# Altium schematic symbol library Silabs.SchLib: 89 symbols (part 2 of 2)
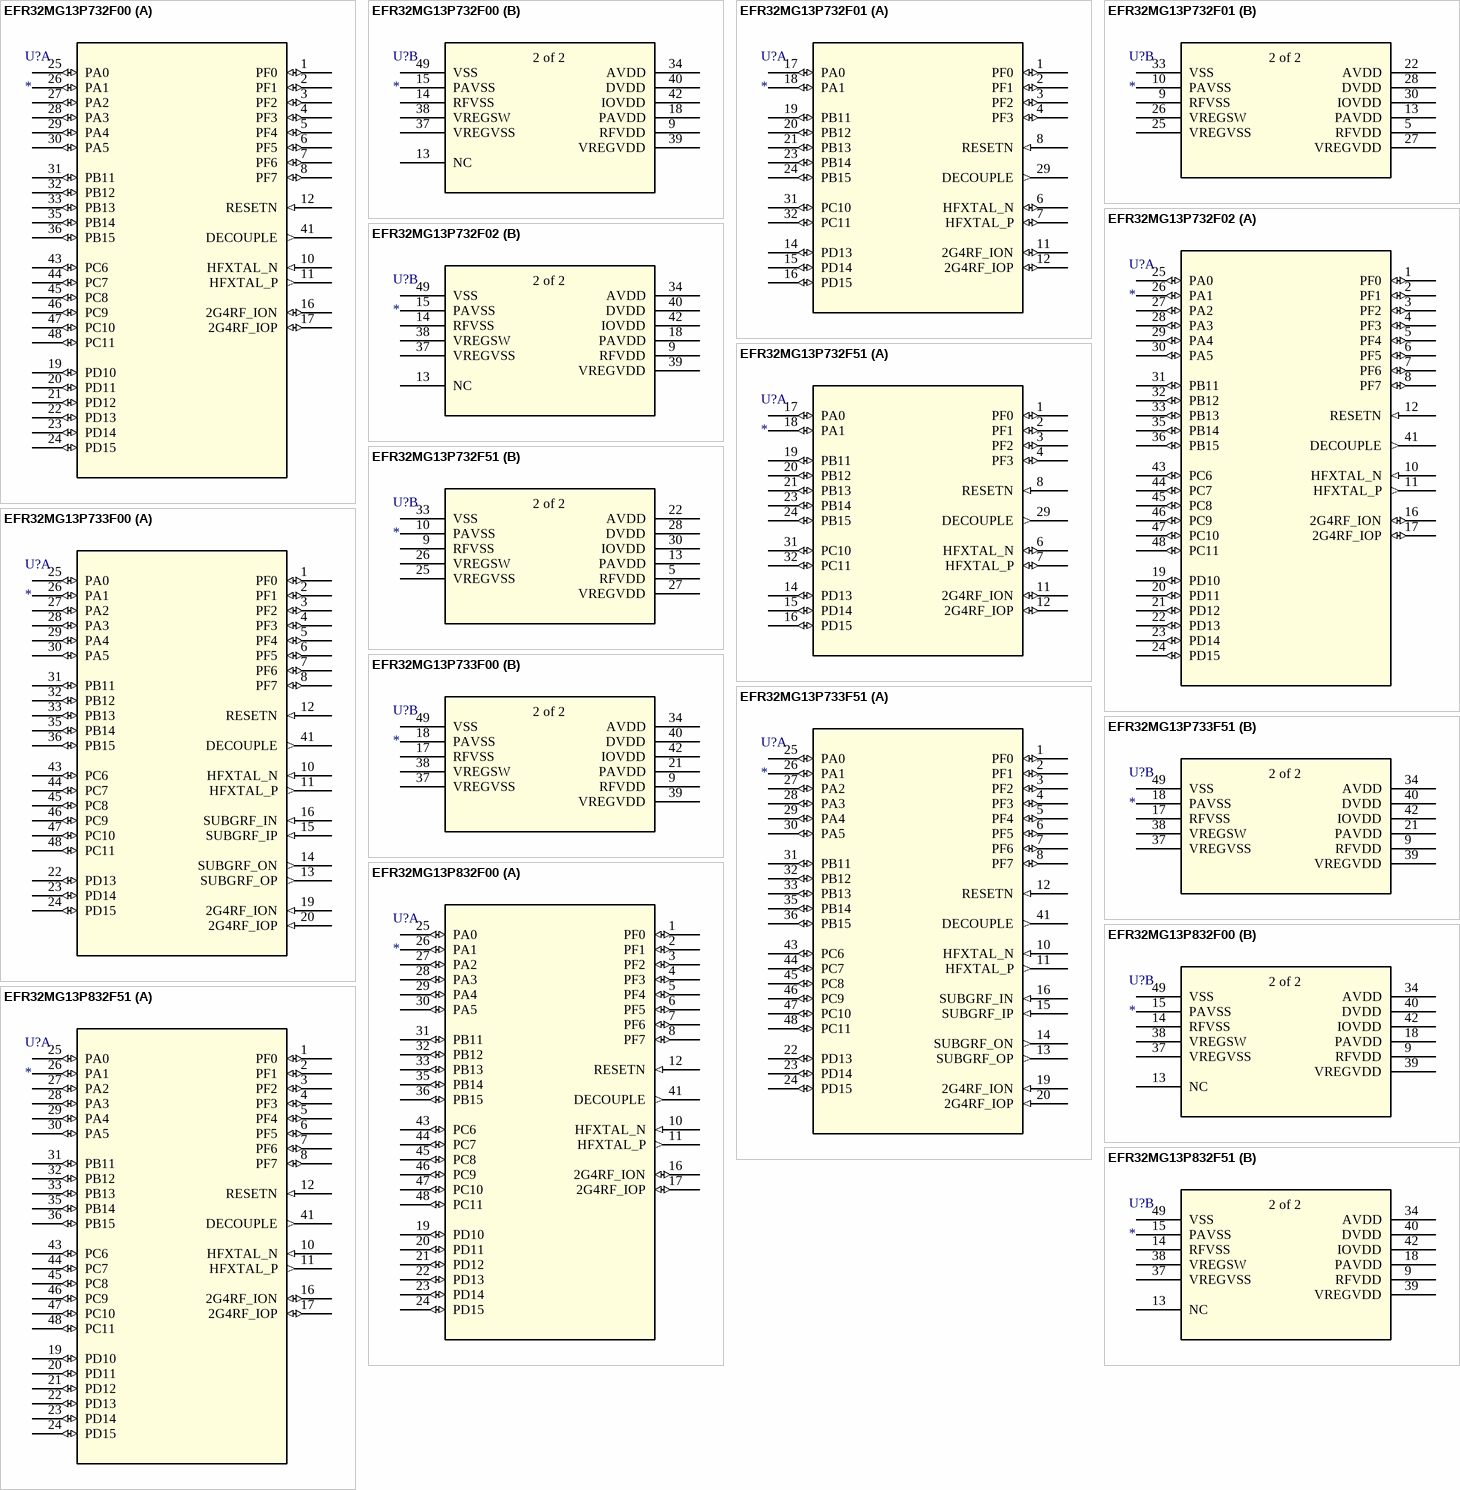
[diagram p12: symbols EFR32MG13P732F00 to EFR32MG13P832F51]

## EFR32MG13P732F51
designator U?
No Description Available; RefDes: RefDes; Type: Type
footprint RQFN32_5X5
part A pins: 1 PF0 (io), 2 PF1 (io), 3 PF2 (io), 4 PF3 (io), 6 HFXTAL_N (io), 7 HFXTAL_P (io), 8 RESETN (in), 11 2G4RF_ION (io), 12 2G4RF_IOP (io), 14 PD13 (io), 15 PD14 (io), 16 PD15 (io), 17 PA0 (io), 18 PA1 (io), 19 PB11 (io), 20 PB12 (io), 21 PB13 (io), 23 PB14 (io), 24 PB15 (io), 29 DECOUPLE (out), 31 PC10 (io), 32 PC11 (io)
part B pins: 5 RFVDD (power), 9 RFVSS (power), 10 PAVSS (power), 13 PAVDD (power), 22 AVDD (power), 25 VREGVSS (power), 26 VREGSW (power), 27 VREGVDD (power), 28 DVDD (power), 30 IOVDD (power), 33 VSS (power)
part B text: 2 of 2

## EFR32MG13P733F00
designator U?
No Description Available; RefDes: RefDes; Type: Type
footprint QFN48B_7X7
part A pins: 1 PF0 (io), 2 PF1 (io), 3 PF2 (io), 4 PF3 (io), 5 PF4 (io), 6 PF5 (io), 7 PF6 (io), 8 PF7 (io), 10 HFXTAL_N (in), 11 HFXTAL_P (out), 12 RESETN (in), 13 SUBGRF_OP (out), 14 SUBGRF_ON (out), 15 SUBGRF_IP (in), 16 SUBGRF_IN (in), 19 2G4RF_ION (in), 20 2G4RF_IOP (in), 22 PD13 (io), 23 PD14 (io), 24 PD15 (io), 25 PA0 (io), 26 PA1 (io), 27 PA2 (io), 28 PA3 (io), 29 PA4 (io), 30 PA5 (io), 31 PB11 (io), 32 PB12 (io), 33 PB13 (io), 35 PB14 (io), 36 PB15 (io), 41 DECOUPLE (out), 43 PC6 (io), 44 PC7 (io), 45 PC8 (io), 46 PC9 (io), 47 PC10 (io), 48 PC11 (io)
part B pins: 9 RFVDD (power), 17 RFVSS (power), 18 PAVSS (power), 21 PAVDD (power), 34 AVDD (power), 37 VREGVSS (power), 38 VREGSW (power), 39 VREGVDD (power), 40 DVDD (power), 42 IOVDD (power), 49 VSS (power)
part B text: 2 of 2

## EFR32MG13P733F51
designator U?
No Description Available; RefDes: RefDes; Type: Type
footprint QFN48B_7X7
part A pins: 1 PF0 (io), 2 PF1 (io), 3 PF2 (io), 4 PF3 (io), 5 PF4 (io), 6 PF5 (io), 7 PF6 (io), 8 PF7 (io), 10 HFXTAL_N (in), 11 HFXTAL_P (out), 12 RESETN (in), 13 SUBGRF_OP (out), 14 SUBGRF_ON (out), 15 SUBGRF_IP (in), 16 SUBGRF_IN (in), 19 2G4RF_ION (in), 20 2G4RF_IOP (in), 22 PD13 (io), 23 PD14 (io), 24 PD15 (io), 25 PA0 (io), 26 PA1 (io), 27 PA2 (io), 28 PA3 (io), 29 PA4 (io), 30 PA5 (io), 31 PB11 (io), 32 PB12 (io), 33 PB13 (io), 35 PB14 (io), 36 PB15 (io), 41 DECOUPLE (out), 43 PC6 (io), 44 PC7 (io), 45 PC8 (io), 46 PC9 (io), 47 PC10 (io), 48 PC11 (io)
part B pins: 9 RFVDD (power), 17 RFVSS (power), 18 PAVSS (power), 21 PAVDD (power), 34 AVDD (power), 37 VREGVSS (power), 38 VREGSW (power), 39 VREGVDD (power), 40 DVDD (power), 42 IOVDD (power), 49 VSS (power)
part B text: 2 of 2

## EFR32MG13P832F00
designator U?
No Description Available; RefDes: RefDes; Type: Type
footprint QFN48B_7X7
part A pins: 1 PF0 (io), 2 PF1 (io), 3 PF2 (io), 4 PF3 (io), 5 PF4 (io), 6 PF5 (io), 7 PF6 (io), 8 PF7 (io), 10 HFXTAL_N (in), 11 HFXTAL_P (out), 12 RESETN (in), 16 2G4RF_ION (io), 17 2G4RF_IOP (io), 19 PD10 (io), 20 PD11 (io), 21 PD12 (io), 22 PD13 (io), 23 PD14 (io), 24 PD15 (io), 25 PA0 (io), 26 PA1 (io), 27 PA2 (io), 28 PA3 (io), 29 PA4 (io), 30 PA5 (io), 31 PB11 (io), 32 PB12 (io), 33 PB13 (io), 35 PB14 (io), 36 PB15 (io), 41 DECOUPLE (out), 43 PC6 (io), 44 PC7 (io), 45 PC8 (io), 46 PC9 (io), 47 PC10 (io), 48 PC11 (io)
part B pins: 9 RFVDD (power), 13 NC, 14 RFVSS (power), 15 PAVSS (power), 18 PAVDD (power), 34 AVDD (power), 37 VREGVSS (power), 38 VREGSW (power), 39 VREGVDD (power), 40 DVDD (power), 42 IOVDD (power), 49 VSS (power)
part B text: 2 of 2

## EFR32MG13P832F51
designator U?
No Description Available; RefDes: RefDes; Type: Type
footprint QFN48B_7X7
part A pins: 1 PF0 (io), 2 PF1 (io), 3 PF2 (io), 4 PF3 (io), 5 PF4 (io), 6 PF5 (io), 7 PF6 (io), 8 PF7 (io), 10 HFXTAL_N (in), 11 HFXTAL_P (out), 12 RESETN (in), 16 2G4RF_ION (io), 17 2G4RF_IOP (io), 19 PD10 (io), 20 PD11 (io), 21 PD12 (io), 22 PD13 (io), 23 PD14 (io), 24 PD15 (io), 25 PA0 (io), 26 PA1 (io), 27 PA2 (io), 28 PA3 (io), 29 PA4 (io), 30 PA5 (io), 31 PB11 (io), 32 PB12 (io), 33 PB13 (io), 35 PB14 (io), 36 PB15 (io), 41 DECOUPLE (out), 43 PC6 (io), 44 PC7 (io), 45 PC8 (io), 46 PC9 (io), 47 PC10 (io), 48 PC11 (io)
part B pins: 9 RFVDD (power), 13 NC, 14 RFVSS (power), 15 PAVSS (power), 18 PAVDD (power), 34 AVDD (power), 37 VREGVSS (power), 38 VREGSW (power), 39 VREGVDD (power), 40 DVDD (power), 42 IOVDD (power), 49 VSS (power)
part B text: 2 of 2

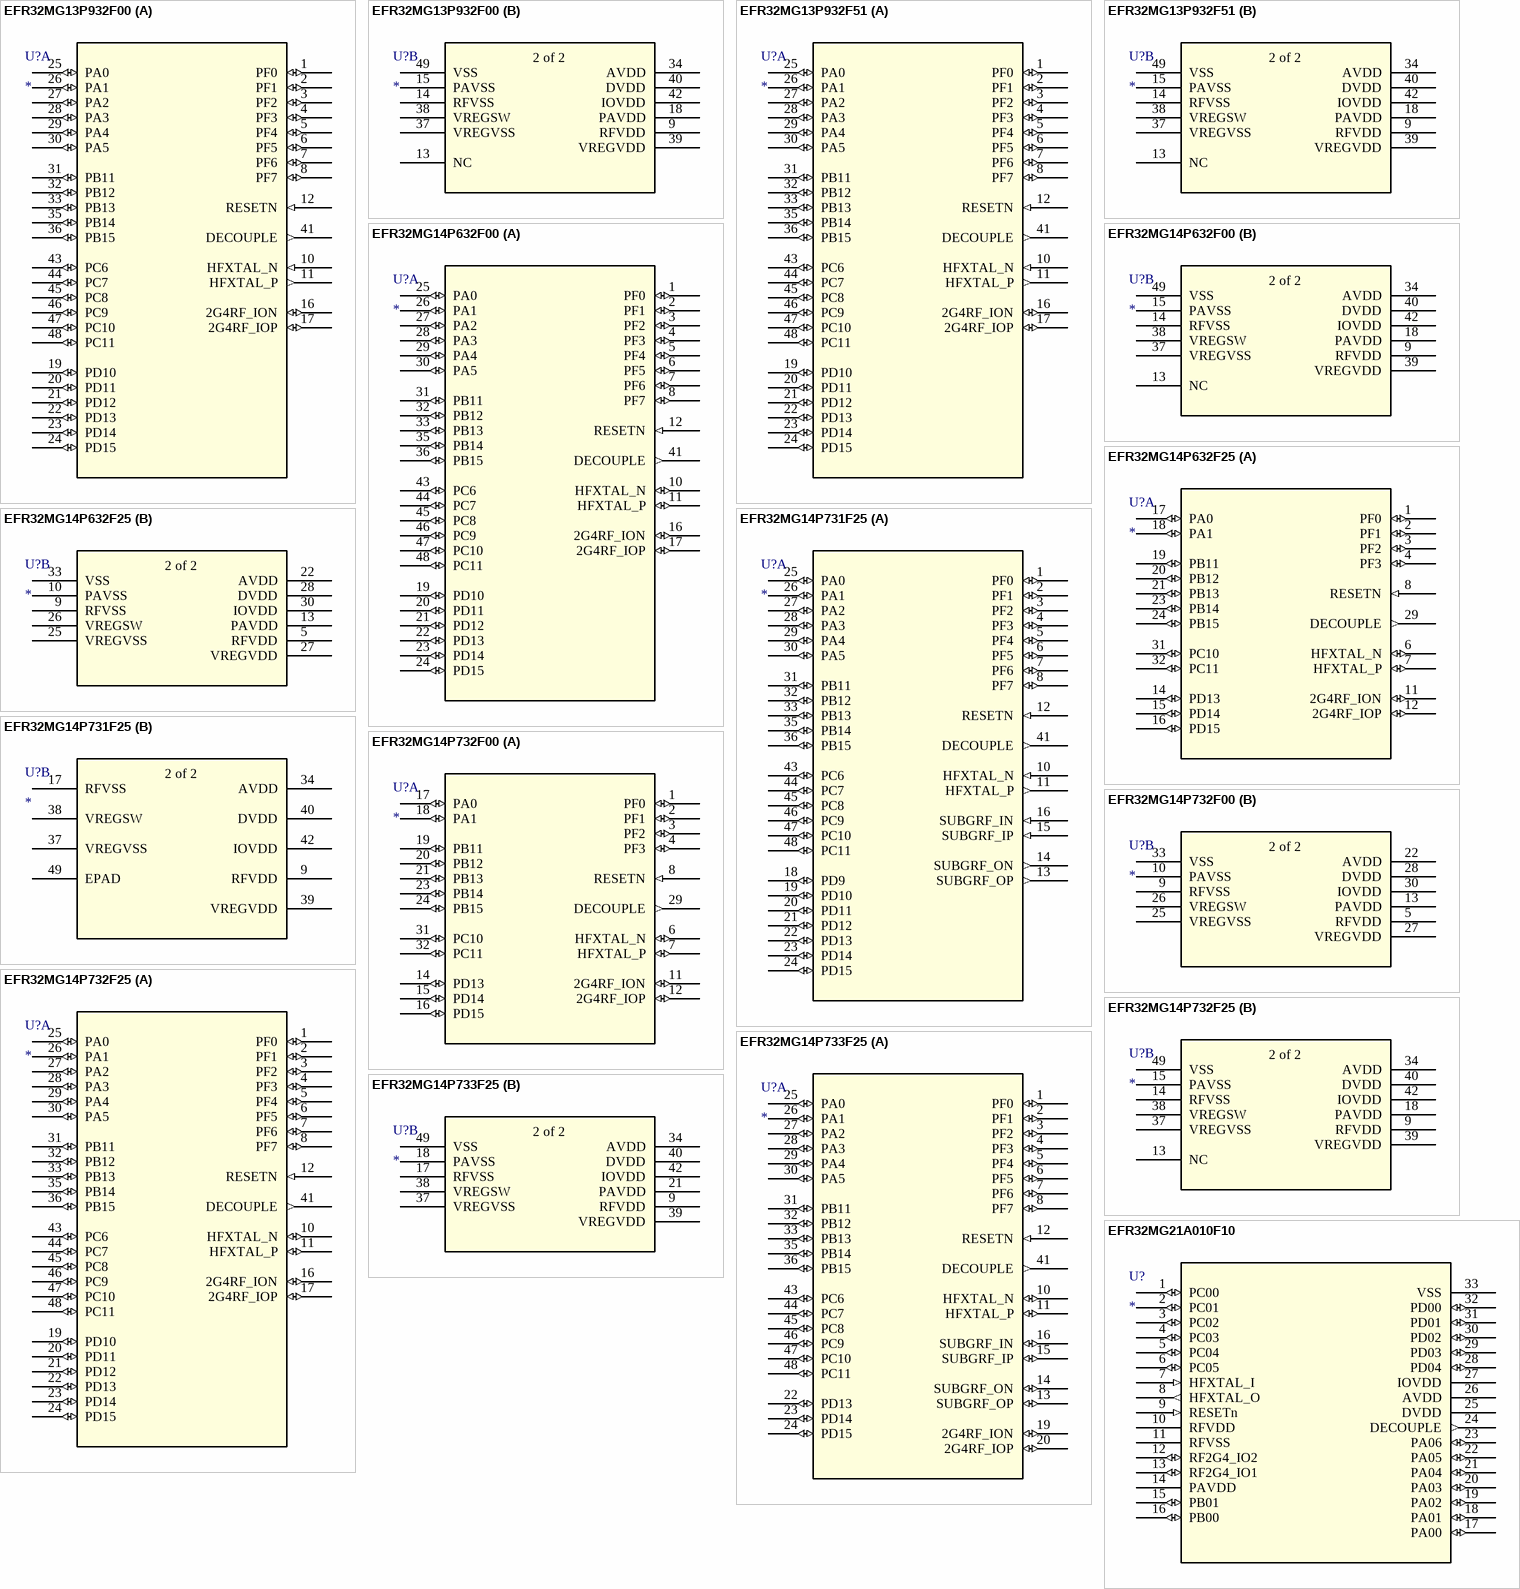
[diagram p8: symbols EFR32MG13P932F00 to EFR32MG21A010F10]

## EFR32MG13P932F00
designator U?
No Description Available; RefDes: RefDes; Type: Type
footprint QFN48B_7X7
part A pins: 1 PF0 (io), 2 PF1 (io), 3 PF2 (io), 4 PF3 (io), 5 PF4 (io), 6 PF5 (io), 7 PF6 (io), 8 PF7 (io), 10 HFXTAL_N (in), 11 HFXTAL_P (out), 12 RESETN (in), 16 2G4RF_ION (io), 17 2G4RF_IOP (io), 19 PD10 (io), 20 PD11 (io), 21 PD12 (io), 22 PD13 (io), 23 PD14 (io), 24 PD15 (io), 25 PA0 (io), 26 PA1 (io), 27 PA2 (io), 28 PA3 (io), 29 PA4 (io), 30 PA5 (io), 31 PB11 (io), 32 PB12 (io), 33 PB13 (io), 35 PB14 (io), 36 PB15 (io), 41 DECOUPLE (out), 43 PC6 (io), 44 PC7 (io), 45 PC8 (io), 46 PC9 (io), 47 PC10 (io), 48 PC11 (io)
part B pins: 9 RFVDD (power), 13 NC, 14 RFVSS (power), 15 PAVSS (power), 18 PAVDD (power), 34 AVDD (power), 37 VREGVSS (power), 38 VREGSW (power), 39 VREGVDD (power), 40 DVDD (power), 42 IOVDD (power), 49 VSS (power)
part B text: 2 of 2

## EFR32MG13P932F51
designator U?
No Description Available; RefDes: RefDes; Type: Type
footprint QFN48B_7X7
part A pins: 1 PF0 (io), 2 PF1 (io), 3 PF2 (io), 4 PF3 (io), 5 PF4 (io), 6 PF5 (io), 7 PF6 (io), 8 PF7 (io), 10 HFXTAL_N (in), 11 HFXTAL_P (out), 12 RESETN (in), 16 2G4RF_ION (io), 17 2G4RF_IOP (io), 19 PD10 (io), 20 PD11 (io), 21 PD12 (io), 22 PD13 (io), 23 PD14 (io), 24 PD15 (io), 25 PA0 (io), 26 PA1 (io), 27 PA2 (io), 28 PA3 (io), 29 PA4 (io), 30 PA5 (io), 31 PB11 (io), 32 PB12 (io), 33 PB13 (io), 35 PB14 (io), 36 PB15 (io), 41 DECOUPLE (out), 43 PC6 (io), 44 PC7 (io), 45 PC8 (io), 46 PC9 (io), 47 PC10 (io), 48 PC11 (io)
part B pins: 9 RFVDD (power), 13 NC, 14 RFVSS (power), 15 PAVSS (power), 18 PAVDD (power), 34 AVDD (power), 37 VREGVSS (power), 38 VREGSW (power), 39 VREGVDD (power), 40 DVDD (power), 42 IOVDD (power), 49 VSS (power)
part B text: 2 of 2

## EFR32MG14P632F00
designator U?
No Description Available; RefDes: RefDes; Type: Type
footprint QFN48_7X7
part A pins: 1 PF0 (io), 2 PF1 (io), 3 PF2 (io), 4 PF3 (io), 5 PF4 (io), 6 PF5 (io), 7 PF6 (io), 8 PF7 (io), 10 HFXTAL_N (io), 11 HFXTAL_P (io), 12 RESETN (in), 16 2G4RF_ION (io), 17 2G4RF_IOP (io), 19 PD10 (io), 20 PD11 (io), 21 PD12 (io), 22 PD13 (io), 23 PD14 (io), 24 PD15 (io), 25 PA0 (io), 26 PA1 (io), 27 PA2 (io), 28 PA3 (io), 29 PA4 (io), 30 PA5 (io), 31 PB11 (io), 32 PB12 (io), 33 PB13 (io), 35 PB14 (io), 36 PB15 (io), 41 DECOUPLE (out), 43 PC6 (io), 44 PC7 (io), 45 PC8 (io), 46 PC9 (io), 47 PC10 (io), 48 PC11 (io)
part B pins: 9 RFVDD (power), 13 NC, 14 RFVSS (power), 15 PAVSS (power), 18 PAVDD (power), 34 AVDD (power), 37 VREGVSS (power), 38 VREGSW (power), 39 VREGVDD (power), 40 DVDD (power), 42 IOVDD (power), 49 VSS (power)
part B text: 2 of 2

## EFR32MG14P632F25
designator U?
No Description Available; RefDes: RefDes; Type: Type
footprint QFN32_5X5
part A pins: 1 PF0 (io), 2 PF1 (io), 3 PF2 (io), 4 PF3 (io), 6 HFXTAL_N (io), 7 HFXTAL_P (io), 8 RESETN (in), 11 2G4RF_ION (io), 12 2G4RF_IOP (io), 14 PD13 (io), 15 PD14 (io), 16 PD15 (io), 17 PA0 (io), 18 PA1 (io), 19 PB11 (io), 20 PB12 (io), 21 PB13 (io), 23 PB14 (io), 24 PB15 (io), 29 DECOUPLE (out), 31 PC10 (io), 32 PC11 (io)
part B pins: 5 RFVDD (power), 9 RFVSS (power), 10 PAVSS (power), 13 PAVDD (power), 22 AVDD (power), 25 VREGVSS (power), 26 VREGSW (power), 27 VREGVDD (power), 28 DVDD (power), 30 IOVDD (power), 33 VSS (power)
part B text: 2 of 2

## EFR32MG14P731F25
designator U?
No Description Available; RefDes: RefDes; Type: Type
footprint QFN48_7X7
part A pins: 1 PF0 (io), 2 PF1 (io), 3 PF2 (io), 4 PF3 (io), 5 PF4 (io), 6 PF5 (io), 7 PF6 (io), 8 PF7 (io), 10 HFXTAL_N (in), 11 HFXTAL_P (out), 12 RESETN (in), 13 SUBGRF_OP (out), 14 SUBGRF_ON (out), 15 SUBGRF_IP (in), 16 SUBGRF_IN (in), 18 PD9 (io), 19 PD10 (io), 20 PD11 (io), 21 PD12 (io), 22 PD13 (io), 23 PD14 (io), 24 PD15 (io), 25 PA0 (io), 26 PA1 (io), 27 PA2 (io), 28 PA3 (io), 29 PA4 (io), 30 PA5 (io), 31 PB11 (io), 32 PB12 (io), 33 PB13 (io), 35 PB14 (io), 36 PB15 (io), 41 DECOUPLE (out), 43 PC6 (io), 44 PC7 (io), 45 PC8 (io), 46 PC9 (io), 47 PC10 (io), 48 PC11 (io)
part B pins: 9 RFVDD (power), 17 RFVSS (power), 34 AVDD (power), 37 VREGVSS (power), 38 VREGSW (power), 39 VREGVDD (power), 40 DVDD (power), 42 IOVDD (power), 49 EPAD
part B text: 2 of 2

## EFR32MG14P732F00
designator U?
No Description Available; RefDes: RefDes; Type: Type
footprint QFN32_5X5
part A pins: 1 PF0 (io), 2 PF1 (io), 3 PF2 (io), 4 PF3 (io), 6 HFXTAL_N (io), 7 HFXTAL_P (io), 8 RESETN (in), 11 2G4RF_ION (io), 12 2G4RF_IOP (io), 14 PD13 (io), 15 PD14 (io), 16 PD15 (io), 17 PA0 (io), 18 PA1 (io), 19 PB11 (io), 20 PB12 (io), 21 PB13 (io), 23 PB14 (io), 24 PB15 (io), 29 DECOUPLE (out), 31 PC10 (io), 32 PC11 (io)
part B pins: 5 RFVDD (power), 9 RFVSS (power), 10 PAVSS (power), 13 PAVDD (power), 22 AVDD (power), 25 VREGVSS (power), 26 VREGSW (power), 27 VREGVDD (power), 28 DVDD (power), 30 IOVDD (power), 33 VSS (power)
part B text: 2 of 2

## EFR32MG14P732F25
designator U?
No Description Available; RefDes: RefDes; Type: Type
footprint QFN48_7X7
part A pins: 1 PF0 (io), 2 PF1 (io), 3 PF2 (io), 4 PF3 (io), 5 PF4 (io), 6 PF5 (io), 7 PF6 (io), 8 PF7 (io), 10 HFXTAL_N (io), 11 HFXTAL_P (io), 12 RESETN (in), 16 2G4RF_ION (io), 17 2G4RF_IOP (io), 19 PD10 (io), 20 PD11 (io), 21 PD12 (io), 22 PD13 (io), 23 PD14 (io), 24 PD15 (io), 25 PA0 (io), 26 PA1 (io), 27 PA2 (io), 28 PA3 (io), 29 PA4 (io), 30 PA5 (io), 31 PB11 (io), 32 PB12 (io), 33 PB13 (io), 35 PB14 (io), 36 PB15 (io), 41 DECOUPLE (out), 43 PC6 (io), 44 PC7 (io), 45 PC8 (io), 46 PC9 (io), 47 PC10 (io), 48 PC11 (io)
part B pins: 9 RFVDD (power), 13 NC, 14 RFVSS (power), 15 PAVSS (power), 18 PAVDD (power), 34 AVDD (power), 37 VREGVSS (power), 38 VREGSW (power), 39 VREGVDD (power), 40 DVDD (power), 42 IOVDD (power), 49 VSS (power)
part B text: 2 of 2

## EFR32MG14P733F25
designator U?
No Description Available; RefDes: RefDes; Type: Type
footprint QFN48_7X7
part A pins: 1 PF0 (io), 2 PF1 (io), 3 PF2 (io), 4 PF3 (io), 5 PF4 (io), 6 PF5 (io), 7 PF6 (io), 8 PF7 (io), 10 HFXTAL_N (io), 11 HFXTAL_P (io), 12 RESETN (in), 13 SUBGRF_OP (io), 14 SUBGRF_ON (io), 15 SUBGRF_IP (io), 16 SUBGRF_IN (io), 19 2G4RF_ION (io), 20 2G4RF_IOP (io), 22 PD13 (io), 23 PD14 (io), 24 PD15 (io), 25 PA0 (io), 26 PA1 (io), 27 PA2 (io), 28 PA3 (io), 29 PA4 (io), 30 PA5 (io), 31 PB11 (io), 32 PB12 (io), 33 PB13 (io), 35 PB14 (io), 36 PB15 (io), 41 DECOUPLE (out), 43 PC6 (io), 44 PC7 (io), 45 PC8 (io), 46 PC9 (io), 47 PC10 (io), 48 PC11 (io)
part B pins: 9 RFVDD (power), 17 RFVSS (power), 18 PAVSS (power), 21 PAVDD (power), 34 AVDD (power), 37 VREGVSS (power), 38 VREGSW (power), 39 VREGVDD (power), 40 DVDD (power), 42 IOVDD (power), 49 VSS (power)
part B text: 2 of 2

## EFR32MG21A010F10
designator U?
No Description Available; RefDes: RefDes; Type: Type
footprint QFN32_4X4
pins: 1 PC00 (io), 2 PC01 (io), 3 PC02 (io), 4 PC03 (io), 5 PC04 (io), 6 PC05 (io), 7 HFXTAL_I (in), 8 HFXTAL_O (out), 9 RESETn (in), 10 RFVDD (power), 11 RFVSS (power), 12 RF2G4_IO2 (io), 13 RF2G4_IO1 (io), 14 PAVDD (power), 15 PB01 (io), 16 PB00 (io), 17 PA00 (io), 18 PA01 (io), 19 PA02 (io), 20 PA03 (io), 21 PA04 (io), 22 PA05 (io), 23 PA06 (io), 24 DECOUPLE (out), 25 DVDD (power), 26 AVDD (power), 27 IOVDD (power), 28 PD04 (io), 29 PD03 (io), 30 PD02 (io), 31 PD01 (io), 32 PD00 (io), 33 VSS (power)

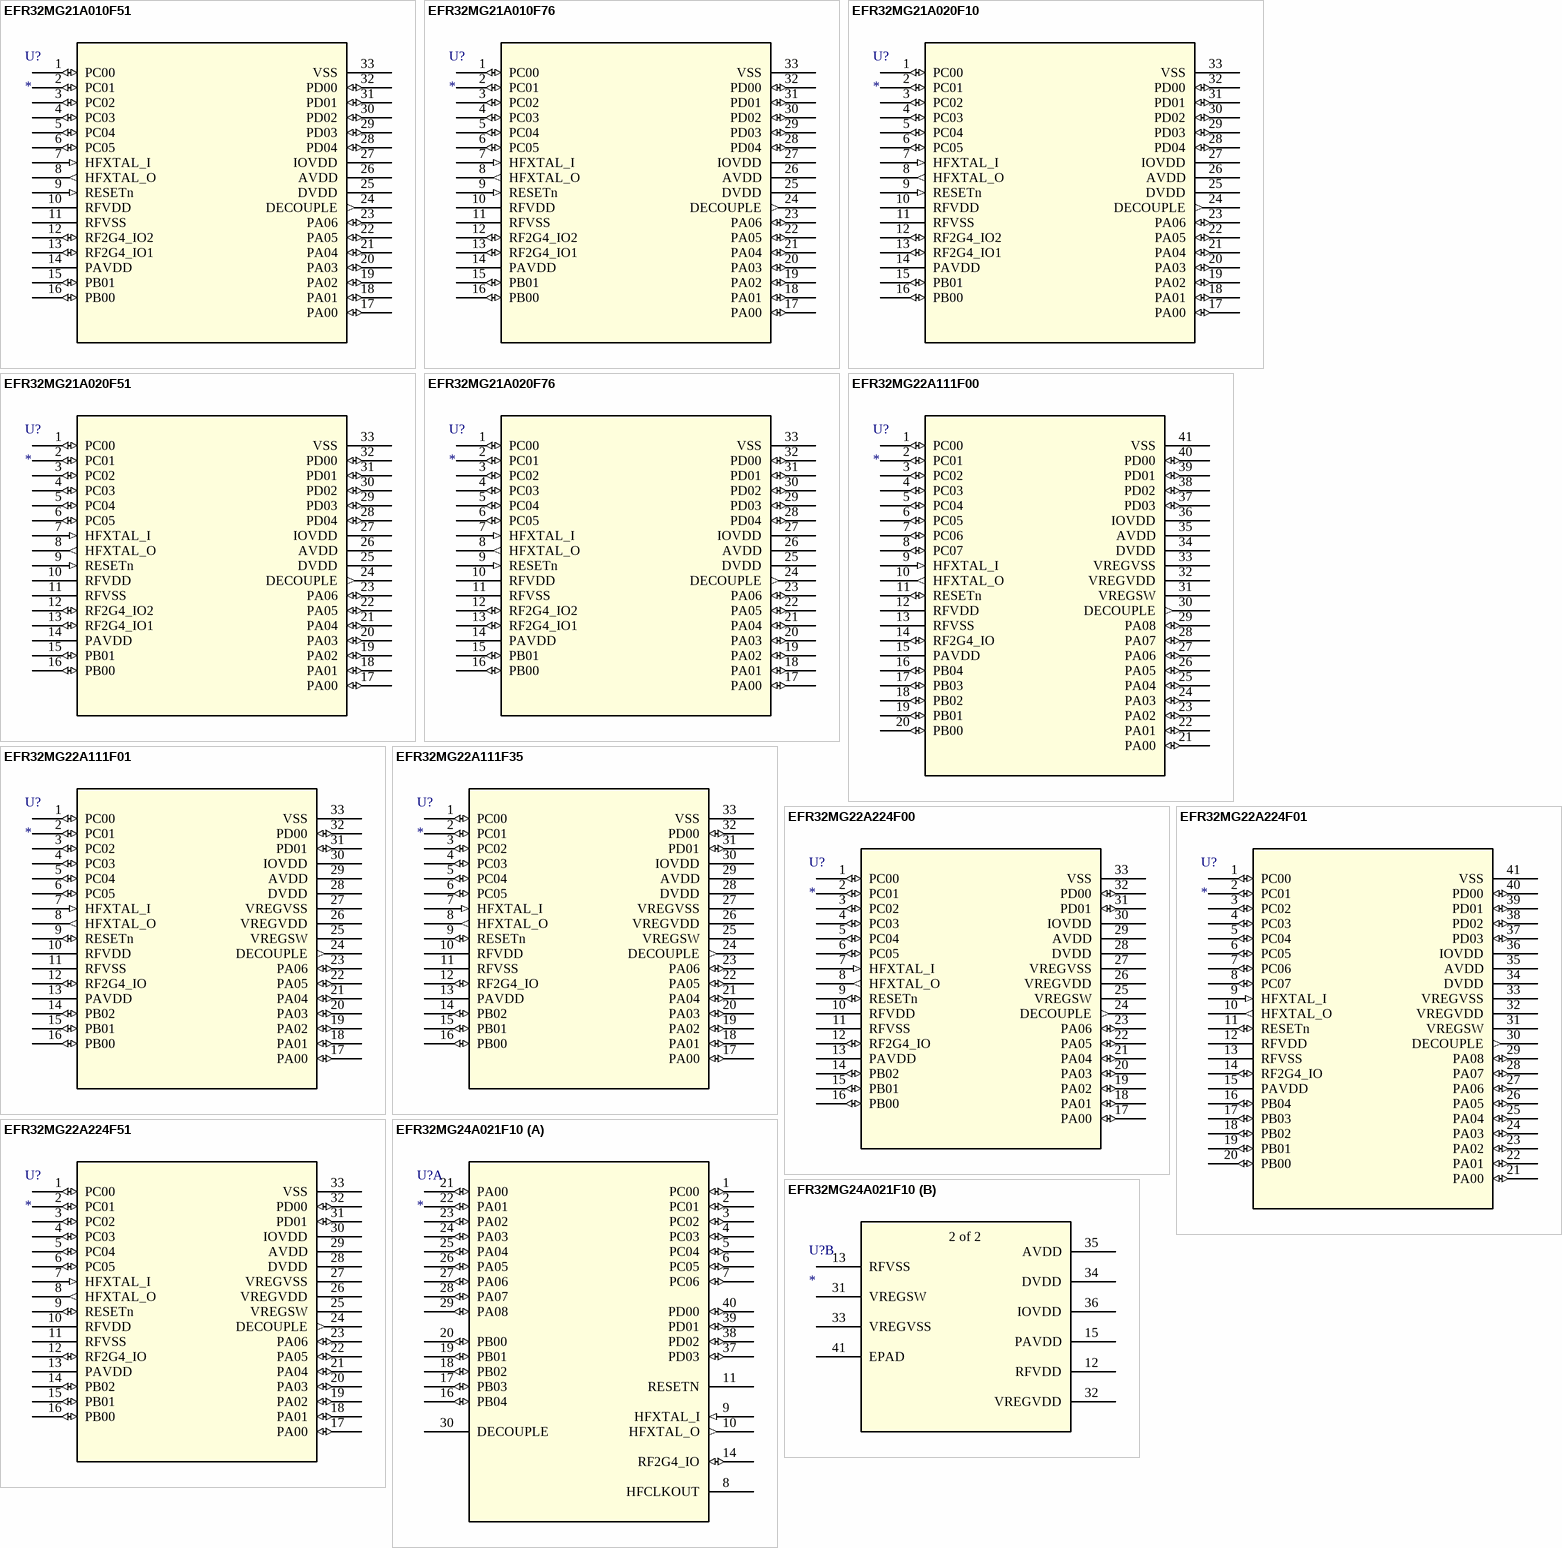
[diagram p9: symbols EFR32MG21A010F51 to EFR32MG24A021F10]

## EFR32MG21A010F51
designator U?
No Description Available; RefDes: RefDes; Type: Type
footprint QFN32_4X4
pins: 1 PC00 (io), 2 PC01 (io), 3 PC02 (io), 4 PC03 (io), 5 PC04 (io), 6 PC05 (io), 7 HFXTAL_I (in), 8 HFXTAL_O (out), 9 RESETn (in), 10 RFVDD (power), 11 RFVSS (power), 12 RF2G4_IO2 (io), 13 RF2G4_IO1 (io), 14 PAVDD (power), 15 PB01 (io), 16 PB00 (io), 17 PA00 (io), 18 PA01 (io), 19 PA02 (io), 20 PA03 (io), 21 PA04 (io), 22 PA05 (io), 23 PA06 (io), 24 DECOUPLE (out), 25 DVDD (power), 26 AVDD (power), 27 IOVDD (power), 28 PD04 (io), 29 PD03 (io), 30 PD02 (io), 31 PD01 (io), 32 PD00 (io), 33 VSS (power)

## EFR32MG21A010F76
designator U?
No Description Available; RefDes: RefDes; Type: Type
footprint QFN32_4X4
pins: 1 PC00 (io), 2 PC01 (io), 3 PC02 (io), 4 PC03 (io), 5 PC04 (io), 6 PC05 (io), 7 HFXTAL_I (in), 8 HFXTAL_O (out), 9 RESETn (in), 10 RFVDD (power), 11 RFVSS (power), 12 RF2G4_IO2 (io), 13 RF2G4_IO1 (io), 14 PAVDD (power), 15 PB01 (io), 16 PB00 (io), 17 PA00 (io), 18 PA01 (io), 19 PA02 (io), 20 PA03 (io), 21 PA04 (io), 22 PA05 (io), 23 PA06 (io), 24 DECOUPLE (out), 25 DVDD (power), 26 AVDD (power), 27 IOVDD (power), 28 PD04 (io), 29 PD03 (io), 30 PD02 (io), 31 PD01 (io), 32 PD00 (io), 33 VSS (power)

## EFR32MG21A020F10
designator U?
No Description Available; RefDes: RefDes; Type: Type
footprint QFN32_4X4
pins: 1 PC00 (io), 2 PC01 (io), 3 PC02 (io), 4 PC03 (io), 5 PC04 (io), 6 PC05 (io), 7 HFXTAL_I (in), 8 HFXTAL_O (out), 9 RESETn (in), 10 RFVDD (power), 11 RFVSS (power), 12 RF2G4_IO2 (io), 13 RF2G4_IO1 (io), 14 PAVDD (power), 15 PB01 (io), 16 PB00 (io), 17 PA00 (io), 18 PA01 (io), 19 PA02 (io), 20 PA03 (io), 21 PA04 (io), 22 PA05 (io), 23 PA06 (io), 24 DECOUPLE (out), 25 DVDD (power), 26 AVDD (power), 27 IOVDD (power), 28 PD04 (io), 29 PD03 (io), 30 PD02 (io), 31 PD01 (io), 32 PD00 (io), 33 VSS (power)

## EFR32MG21A020F51
designator U?
No Description Available; RefDes: RefDes; Type: Type
footprint QFN32_4X4
pins: 1 PC00 (io), 2 PC01 (io), 3 PC02 (io), 4 PC03 (io), 5 PC04 (io), 6 PC05 (io), 7 HFXTAL_I (in), 8 HFXTAL_O (out), 9 RESETn (in), 10 RFVDD (power), 11 RFVSS (power), 12 RF2G4_IO2 (io), 13 RF2G4_IO1 (io), 14 PAVDD (power), 15 PB01 (io), 16 PB00 (io), 17 PA00 (io), 18 PA01 (io), 19 PA02 (io), 20 PA03 (io), 21 PA04 (io), 22 PA05 (io), 23 PA06 (io), 24 DECOUPLE (out), 25 DVDD (power), 26 AVDD (power), 27 IOVDD (power), 28 PD04 (io), 29 PD03 (io), 30 PD02 (io), 31 PD01 (io), 32 PD00 (io), 33 VSS (power)

## EFR32MG21A020F76
designator U?
No Description Available; RefDes: RefDes; Type: Type
footprint QFN32_4X4
pins: 1 PC00 (io), 2 PC01 (io), 3 PC02 (io), 4 PC03 (io), 5 PC04 (io), 6 PC05 (io), 7 HFXTAL_I (in), 8 HFXTAL_O (out), 9 RESETn (in), 10 RFVDD (power), 11 RFVSS (power), 12 RF2G4_IO2 (io), 13 RF2G4_IO1 (io), 14 PAVDD (power), 15 PB01 (io), 16 PB00 (io), 17 PA00 (io), 18 PA01 (io), 19 PA02 (io), 20 PA03 (io), 21 PA04 (io), 22 PA05 (io), 23 PA06 (io), 24 DECOUPLE (out), 25 DVDD (power), 26 AVDD (power), 27 IOVDD (power), 28 PD04 (io), 29 PD03 (io), 30 PD02 (io), 31 PD01 (io), 32 PD00 (io), 33 VSS (power)

## EFR32MG22A111F00
designator U?
No Description Available; RefDes: RefDes; Type: Type
footprint QFN40_5X5
pins: 1 PC00 (io), 2 PC01 (io), 3 PC02 (io), 4 PC03 (io), 5 PC04 (io), 6 PC05 (io), 7 PC06 (io), 8 PC07 (io), 9 HFXTAL_I (in), 10 HFXTAL_O (out), 11 RESETn (io), 12 RFVDD (power), 13 RFVSS (power), 14 RF2G4_IO (io), 15 PAVDD (power), 16 PB04 (io), 17 PB03 (io), 18 PB02 (io), 19 PB01 (io), 20 PB00 (io), 21 PA00 (io), 22 PA01 (io), 23 PA02 (io), 24 PA03 (io), 25 PA04 (io), 26 PA05 (io), 27 PA06 (io), 28 PA07 (io), 29 PA08 (io), 30 DECOUPLE (out), 31 VREGSW, 32 VREGVDD (power), 33 VREGVSS (power), 34 DVDD (power), 35 AVDD (power), 36 IOVDD (power), 37 PD03 (io), 38 PD02 (io), 39 PD01 (io), 40 PD00 (io), 41 VSS (power)

## EFR32MG22A111F01
designator U?
No Description Available; RefDes: RefDes; Type: Type
footprint TQFN32_4X4
pins: 1 PC00 (io), 2 PC01 (io), 3 PC02 (io), 4 PC03 (io), 5 PC04 (io), 6 PC05 (io), 7 HFXTAL_I (in), 8 HFXTAL_O (out), 9 RESETn (io), 10 RFVDD (power), 11 RFVSS (power), 12 RF2G4_IO (io), 13 PAVDD (power), 14 PB02 (io), 15 PB01 (io), 16 PB00 (io), 17 PA00 (io), 18 PA01 (io), 19 PA02 (io), 20 PA03 (io), 21 PA04 (io), 22 PA05 (io), 23 PA06 (io), 24 DECOUPLE (out), 25 VREGSW, 26 VREGVDD (power), 27 VREGVSS (power), 28 DVDD (power), 29 AVDD (power), 30 IOVDD (power), 31 PD01 (io), 32 PD00 (io), 33 VSS (power)

## EFR32MG22A111F35
designator U?
No Description Available; RefDes: RefDes; Type: Type
footprint QFN32_4X4
pins: 1 PC00 (io), 2 PC01 (io), 3 PC02 (io), 4 PC03 (io), 5 PC04 (io), 6 PC05 (io), 7 HFXTAL_I (in), 8 HFXTAL_O (out), 9 RESETn (io), 10 RFVDD (power), 11 RFVSS (power), 12 RF2G4_IO (io), 13 PAVDD (power), 14 PB02 (io), 15 PB01 (io), 16 PB00 (io), 17 PA00 (io), 18 PA01 (io), 19 PA02 (io), 20 PA03 (io), 21 PA04 (io), 22 PA05 (io), 23 PA06 (io), 24 DECOUPLE (out), 25 VREGSW, 26 VREGVDD (power), 27 VREGVSS (power), 28 DVDD (power), 29 AVDD (power), 30 IOVDD (power), 31 PD01 (io), 32 PD00 (io), 33 VSS (power)

## EFR32MG22A224F00
designator U?
No Description Available; RefDes: RefDes; Type: Type
footprint QFN32_4X4
pins: 1 PC00 (io), 2 PC01 (io), 3 PC02 (io), 4 PC03 (io), 5 PC04 (io), 6 PC05 (io), 7 HFXTAL_I (in), 8 HFXTAL_O (out), 9 RESETn (io), 10 RFVDD (power), 11 RFVSS (power), 12 RF2G4_IO (io), 13 PAVDD (power), 14 PB02 (io), 15 PB01 (io), 16 PB00 (io), 17 PA00 (io), 18 PA01 (io), 19 PA02 (io), 20 PA03 (io), 21 PA04 (io), 22 PA05 (io), 23 PA06 (io), 24 DECOUPLE (out), 25 VREGSW, 26 VREGVDD (power), 27 VREGVSS (power), 28 DVDD (power), 29 AVDD (power), 30 IOVDD (power), 31 PD01 (io), 32 PD00 (io), 33 VSS (power)

## EFR32MG22A224F01
designator U?
No Description Available; RefDes: RefDes; Type: Type
footprint QFN40_5X5
pins: 1 PC00 (io), 2 PC01 (io), 3 PC02 (io), 4 PC03 (io), 5 PC04 (io), 6 PC05 (io), 7 PC06 (io), 8 PC07 (io), 9 HFXTAL_I (in), 10 HFXTAL_O (out), 11 RESETn (io), 12 RFVDD (power), 13 RFVSS (power), 14 RF2G4_IO (io), 15 PAVDD (power), 16 PB04 (io), 17 PB03 (io), 18 PB02 (io), 19 PB01 (io), 20 PB00 (io), 21 PA00 (io), 22 PA01 (io), 23 PA02 (io), 24 PA03 (io), 25 PA04 (io), 26 PA05 (io), 27 PA06 (io), 28 PA07 (io), 29 PA08 (io), 30 DECOUPLE (out), 31 VREGSW, 32 VREGVDD (power), 33 VREGVSS (power), 34 DVDD (power), 35 AVDD (power), 36 IOVDD (power), 37 PD03 (io), 38 PD02 (io), 39 PD01 (io), 40 PD00 (io), 41 VSS (power)

## EFR32MG22A224F51
designator U?
No Description Available; RefDes: RefDes; Type: Type
footprint TQFN32_4X4
pins: 1 PC00 (io), 2 PC01 (io), 3 PC02 (io), 4 PC03 (io), 5 PC04 (io), 6 PC05 (io), 7 HFXTAL_I (in), 8 HFXTAL_O (out), 9 RESETn (io), 10 RFVDD (power), 11 RFVSS (power), 12 RF2G4_IO (io), 13 PAVDD (power), 14 PB02 (io), 15 PB01 (io), 16 PB00 (io), 17 PA00 (io), 18 PA01 (io), 19 PA02 (io), 20 PA03 (io), 21 PA04 (io), 22 PA05 (io), 23 PA06 (io), 24 DECOUPLE (out), 25 VREGSW, 26 VREGVDD (power), 27 VREGVSS (power), 28 DVDD (power), 29 AVDD (power), 30 IOVDD (power), 31 PD01 (io), 32 PD00 (io), 33 VSS (power)

## EFR32MG24A021F10
designator U?
No Description Available; Datasheet: ,,,; RefDes: RefDes; Type: Type
footprint QFN40_5X5_SIL
part A pins: 1 PC00 (io), 2 PC01 (io), 3 PC02 (io), 4 PC03 (io), 5 PC04 (io), 6 PC05 (io), 7 PC06 (io), 8 HFCLKOUT, 9 HFXTAL_I (in), 10 HFXTAL_O (out), 11 RESETN, 14 RF2G4_IO (io), 16 PB04 (io), 17 PB03 (io), 18 PB02 (io), 19 PB01 (io), 20 PB00 (io), 21 PA00 (io), 22 PA01 (io), 23 PA02 (io), 24 PA03 (io), 25 PA04 (io), 26 PA05 (io), 27 PA06 (io), 28 PA07 (io), 29 PA08 (io), 30 DECOUPLE, 37 PD03 (io), 38 PD02 (io), 39 PD01 (io), 40 PD00 (io)
part B pins: 12 RFVDD (power), 13 RFVSS (power), 15 PAVDD (power), 31 VREGSW (power), 32 VREGVDD (power), 33 VREGVSS (power), 34 DVDD (power), 35 AVDD (power), 36 IOVDD (power), 41 EPAD
part B text: 2 of 2

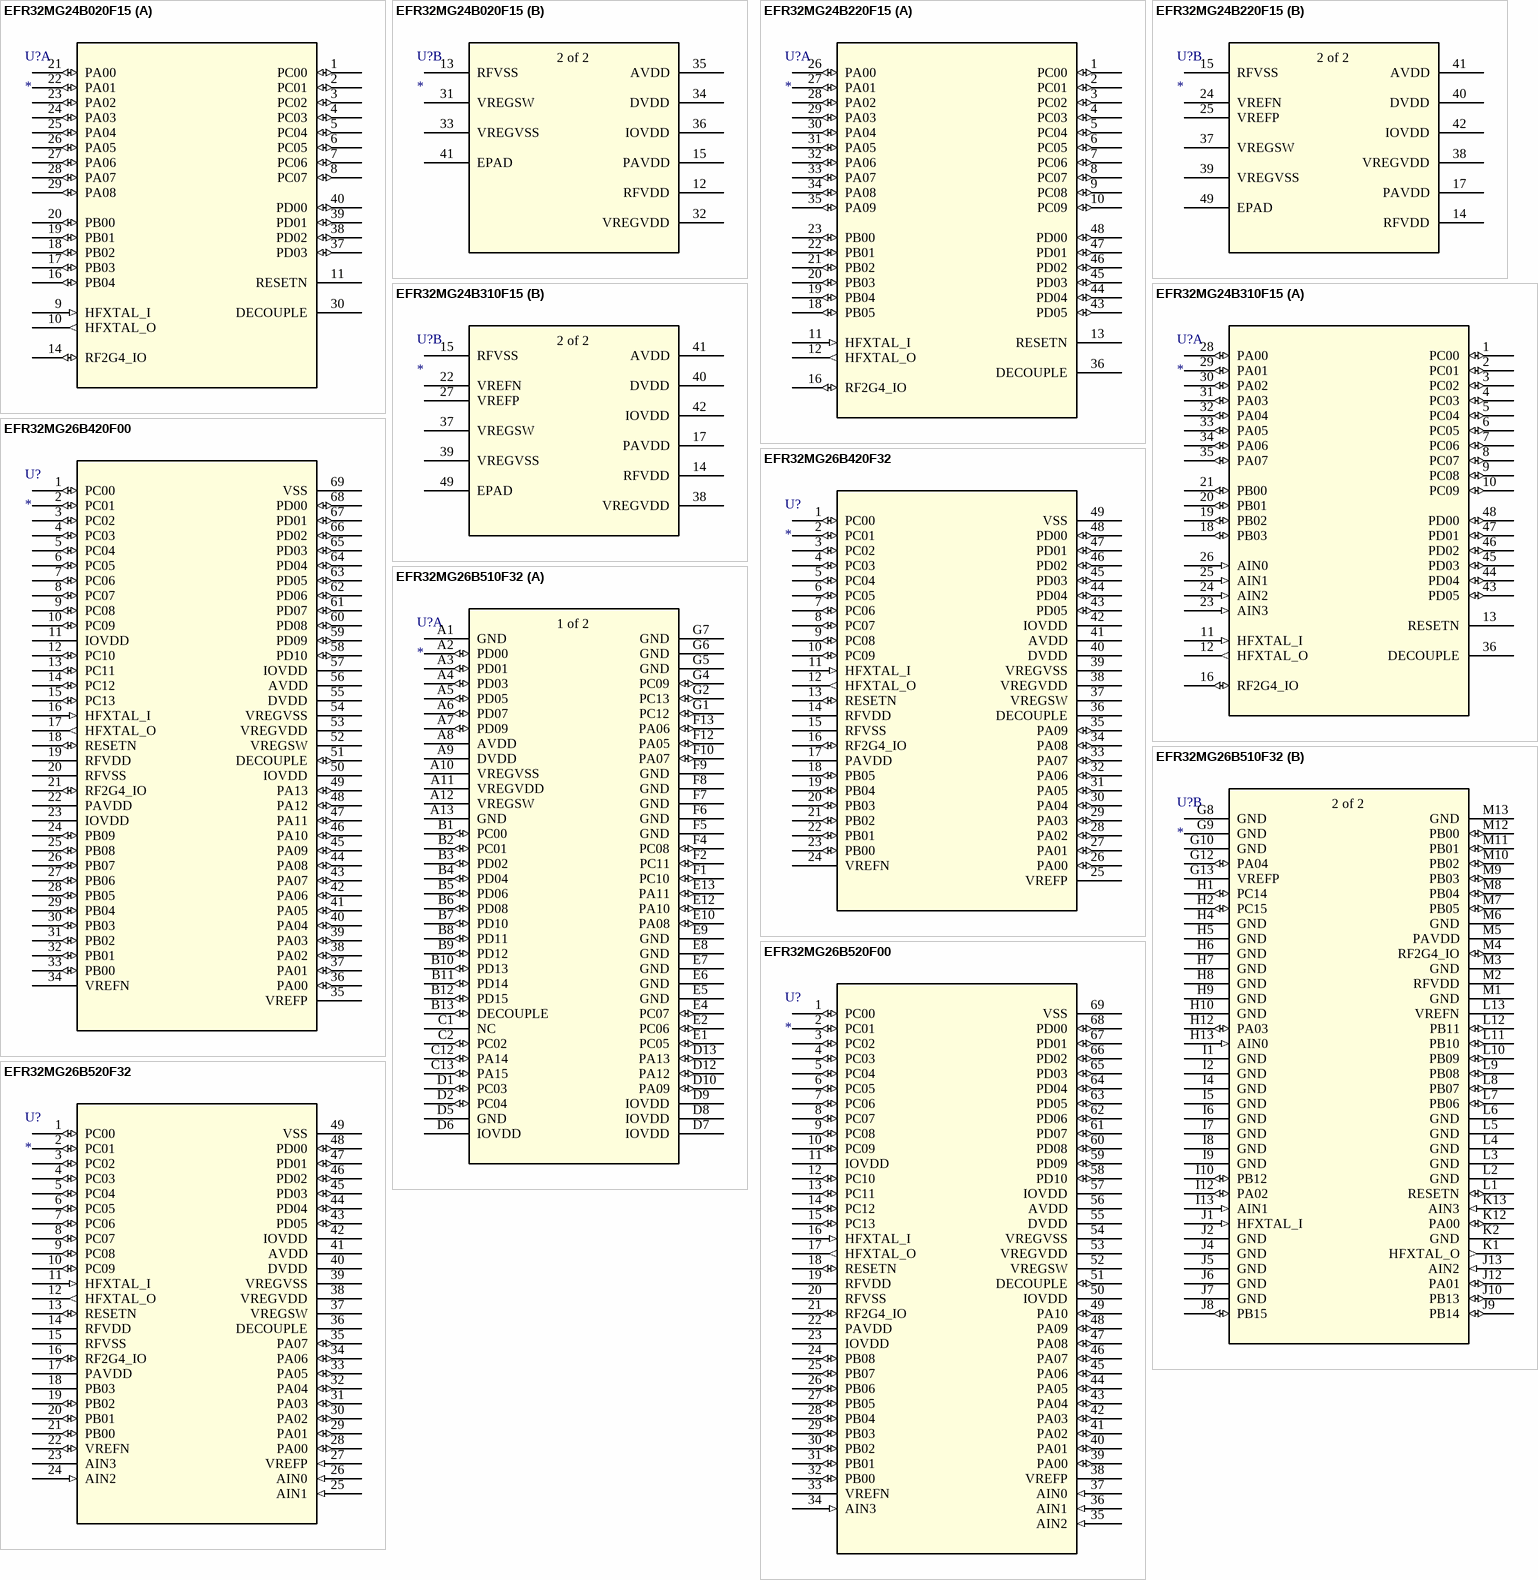
[diagram p10: symbols EFR32MG24B020F15 to EFR32MG26B520F32]

## EFR32MG24B020F15
designator U?
No Description Available; RefDes: RefDes; Type: Type
footprint QFN40_5X5_SIL
part A pins: 1 PC00 (io), 2 PC01 (io), 3 PC02 (io), 4 PC03 (io), 5 PC04 (io), 6 PC05 (io), 7 PC06 (io), 8 PC07 (io), 9 HFXTAL_I (in), 10 HFXTAL_O (out), 11 RESETN, 14 RF2G4_IO (io), 16 PB04 (io), 17 PB03 (io), 18 PB02 (io), 19 PB01 (io), 20 PB00 (io), 21 PA00 (io), 22 PA01 (io), 23 PA02 (io), 24 PA03 (io), 25 PA04 (io), 26 PA05 (io), 27 PA06 (io), 28 PA07 (io), 29 PA08 (io), 30 DECOUPLE, 37 PD03 (io), 38 PD02 (io), 39 PD01 (io), 40 PD00 (io)
part B pins: 12 RFVDD (power), 13 RFVSS (power), 15 PAVDD (power), 31 VREGSW (power), 32 VREGVDD (power), 33 VREGVSS (power), 34 DVDD (power), 35 AVDD (power), 36 IOVDD (power), 41 EPAD
part B text: 2 of 2

## EFR32MG24B220F15
designator U?
No Description Available; RefDes: RefDes; Type: Type
footprint QFN48_0p4_6sq_SIL
part A pins: 1 PC00 (io), 2 PC01 (io), 3 PC02 (io), 4 PC03 (io), 5 PC04 (io), 6 PC05 (io), 7 PC06 (io), 8 PC07 (io), 9 PC08 (io), 10 PC09 (io), 11 HFXTAL_I (in), 12 HFXTAL_O (out), 13 RESETN, 16 RF2G4_IO (io), 18 PB05 (io), 19 PB04 (io), 20 PB03 (io), 21 PB02 (io), 22 PB01 (io), 23 PB00 (io), 26 PA00 (io), 27 PA01 (io), 28 PA02 (io), 29 PA03 (io), 30 PA04 (io), 31 PA05 (io), 32 PA06 (io), 33 PA07 (io), 34 PA08 (io), 35 PA09 (io), 36 DECOUPLE, 43 PD05 (io), 44 PD04 (io), 45 PD03 (io), 46 PD02 (io), 47 PD01 (io), 48 PD00 (io)
part B pins: 14 RFVDD (power), 15 RFVSS (power), 17 PAVDD (power), 24 VREFN (power), 25 VREFP (power), 37 VREGSW (power), 38 VREGVDD (power), 39 VREGVSS (power), 40 DVDD (power), 41 AVDD (power), 42 IOVDD (power), 49 EPAD
part B text: 2 of 2

## EFR32MG24B310F15
designator U?
No Description Available; RefDes: RefDes; Type: Type
footprint QFN48_0p4_6sq_SIL
part A pins: 1 PC00 (io), 2 PC01 (io), 3 PC02 (io), 4 PC03 (io), 5 PC04 (io), 6 PC05 (io), 7 PC06 (io), 8 PC07 (io), 9 PC08 (io), 10 PC09 (io), 11 HFXTAL_I (in), 12 HFXTAL_O (out), 13 RESETN, 16 RF2G4_IO (io), 18 PB03 (io), 19 PB02 (io), 20 PB01 (io), 21 PB00 (io), 23 AIN3 (in), 24 AIN2 (in), 25 AIN1 (in), 26 AIN0 (in), 28 PA00 (io), 29 PA01 (io), 30 PA02 (io), 31 PA03 (io), 32 PA04 (io), 33 PA05 (io), 34 PA06 (io), 35 PA07 (io), 36 DECOUPLE, 43 PD05 (io), 44 PD04 (io), 45 PD03 (io), 46 PD02 (io), 47 PD01 (io), 48 PD00 (io)
part B pins: 14 RFVDD (power), 15 RFVSS (power), 17 PAVDD (power), 22 VREFN (power), 27 VREFP (power), 37 VREGSW (power), 38 VREGVDD (power), 39 VREGVSS (power), 40 DVDD (power), 41 AVDD (power), 42 IOVDD (power), 49 EPAD
part B text: 2 of 2

## EFR32MG26B420F00
designator U?
No Description Available; RefDes: RefDes; Type: Type
footprint QFN68_8X8_SIL
pins: 1 PC00 (io), 2 PC01 (io), 3 PC02 (io), 4 PC03 (io), 5 PC04 (io), 6 PC05 (io), 7 PC06 (io), 8 PC07 (io), 9 PC08 (io), 10 PC09 (io), 11 IOVDD (power), 12 PC10 (io), 13 PC11 (io), 14 PC12 (io), 15 PC13 (io), 16 HFXTAL_I (in), 17 HFXTAL_O (out), 18 RESETN (io), 19 RFVDD (power), 20 RFVSS (power), 21 RF2G4_IO (io), 22 PAVDD (power), 23 IOVDD (power), 24 PB09 (io), 25 PB08 (io), 26 PB07 (io), 27 PB06 (io), 28 PB05 (io), 29 PB04 (io), 30 PB03 (io), 31 PB02 (io), 32 PB01 (io), 33 PB00 (io), 34 VREFN (power), 35 VREFP (power), 36 PA00 (io), 37 PA01 (io), 38 PA02 (io), 39 PA03 (io), 40 PA04 (io), 41 PA05 (io), 42 PA06 (io), 43 PA07 (io), 44 PA08 (io), 45 PA09 (io), 46 PA10 (io), 47 PA11 (io), 48 PA12 (io), 49 PA13 (io), 50 IOVDD (power), 51 DECOUPLE (io), 52 VREGSW (power), 53 VREGVDD (power), 54 VREGVSS (power), 55 DVDD (power), 56 AVDD (power), 57 IOVDD (power), 58 PD10 (io), 59 PD09 (io), 60 PD08 (io), 61 PD07 (io), 62 PD06 (io), 63 PD05 (io), 64 PD04 (io), 65 PD03 (io), 66 PD02 (io), 67 PD01 (io), 68 PD00 (io), 69 VSS (power)

## EFR32MG26B420F32
designator U?
No Description Available; RefDes: RefDes; Type: Type
footprint QFN_48_SIL
pins: 1 PC00 (io), 2 PC01 (io), 3 PC02 (io), 4 PC03 (io), 5 PC04 (io), 6 PC05 (io), 7 PC06 (io), 8 PC07 (io), 9 PC08 (io), 10 PC09 (io), 11 HFXTAL_I (in), 12 HFXTAL_O (out), 13 RESETN (io), 14 RFVDD (power), 15 RFVSS (power), 16 RF2G4_IO (io), 17 PAVDD (power), 18 PB05 (io), 19 PB04 (io), 20 PB03 (io), 21 PB02 (io), 22 PB01 (io), 23 PB00 (io), 24 VREFN (power), 25 VREFP (power), 26 PA00 (io), 27 PA01 (io), 28 PA02 (io), 29 PA03 (io), 30 PA04 (io), 31 PA05 (io), 32 PA06 (io), 33 PA07 (io), 34 PA08 (io), 35 PA09 (io), 36 DECOUPLE, 37 VREGSW (power), 38 VREGVDD (power), 39 VREGVSS (power), 40 DVDD (power), 41 AVDD (power), 42 IOVDD (power), 43 PD05 (io), 44 PD04 (io), 45 PD03 (io), 46 PD02 (io), 47 PD01 (io), 48 PD00 (io), 49 VSS (power)

## EFR32MG26B510F32
designator U?
No Description Available; RefDes: RefDes; Type: Type
footprint BGA136_SIL
part A pins: A1 GND (power), A2 PD00 (io), A3 PD01 (io), A4 PD03 (io), A5 PD05 (io), A6 PD07 (io), A7 PD09 (io), A8 AVDD (power), A9 DVDD (power), A10 VREGVSS (power), A11 VREGVDD (power), A12 VREGSW (power), A13 GND (power), B1 PC00 (io), B2 PC01 (io), B3 PD02 (io), B4 PD04 (io), B5 PD06 (io), B6 PD08 (io), B7 PD10 (io), B8 PD11 (io), B9 PD12 (io), B10 PD13 (io), B11 PD14 (io), B12 PD15 (io), B13 DECOUPLE (io), C1 NC, C2 PC02 (io), C12 PA14 (io), C13 PA15 (io), D1 PC03 (io), D2 PC04 (io), D5 GND (power), D6 IOVDD (power), D7 IOVDD (power), D8 IOVDD (power), D9 IOVDD (power), D10 PA09 (io), D12 PA12 (io), D13 PA13 (io), E1 PC05 (io), E2 PC06 (io), E4 PC07 (io), E5 GND (power), E6 GND (power), E7 GND (power), E8 GND (power), E9 GND (power), E10 PA08 (io), E12 PA10 (io), E13 PA11 (io), F1 PC10 (io), F2 PC11 (io), F4 PC08 (io), F5 GND (power), F6 GND (power), F7 GND (power), F8 GND (power), F9 GND (power), F10 PA07 (io), F12 PA05 (io), F13 PA06 (io), G1 PC12 (io), G2 PC13 (io), G4 PC09 (io), G5 GND (power), G6 GND (power), G7 GND (power)
part B pins: G8 GND (power), G9 GND (power), G10 GND (power), G12 PA04 (io), G13 VREFP (power), H1 PC14 (io), H2 PC15 (io), H4 GND (power), H5 GND (power), H6 GND (power), H7 GND (power), H8 GND (power), H9 GND (power), H10 GND (power), H12 PA03 (io), H13 AIN0 (in), I1 GND (power), I2 GND (power), I4 GND (power), I5 GND (power), I6 GND (power), I7 GND (power), I8 GND (power), I9 GND (power), I10 PB12 (io), I12 PA02 (io), I13 AIN1 (in), J1 HFXTAL_I (in), J2 GND (power), J4 GND (power), J5 GND (power), J6 GND (power), J7 GND (power), J8 PB15 (io), J9 PB14 (io), J10 PB13 (io), J12 PA01 (io), J13 AIN2 (in), K1 HFXTAL_O (out), K2 GND (power), K12 PA00 (io), K13 AIN3 (in), L1 RESETN (io), L2 GND (power), L3 GND (power), L4 GND (power), L5 GND (power), L6 GND (power), L7 PB06 (io), L8 PB07 (io), L9 PB08 (io), L10 PB09 (io), L11 PB10 (io), L12 PB11 (io), L13 VREFN (power), M1 GND (power), M2 RFVDD (power), M3 GND (power), M4 RF2G4_IO (io), M5 PAVDD (power), M6 GND (power), M7 PB05 (io), M8 PB04 (io), M9 PB03 (io), M10 PB02 (io), M11 PB01 (io), M12 PB00 (io), M13 GND (power)
part A text: 1 of 2
part B text: 2 of 2

## EFR32MG26B520F00
designator U?
No Description Available; RefDes: RefDes; Type: Type
footprint QFN68_8X8_SIL
pins: 1 PC00 (io), 2 PC01 (io), 3 PC02 (io), 4 PC03 (io), 5 PC04 (io), 6 PC05 (io), 7 PC06 (io), 8 PC07 (io), 9 PC08 (io), 10 PC09 (io), 11 IOVDD (power), 12 PC10 (io), 13 PC11 (io), 14 PC12 (io), 15 PC13 (io), 16 HFXTAL_I (in), 17 HFXTAL_O (out), 18 RESETN (io), 19 RFVDD (power), 20 RFVSS (power), 21 RF2G4_IO (io), 22 PAVDD (power), 23 IOVDD (power), 24 PB08 (io), 25 PB07 (io), 26 PB06 (io), 27 PB05 (io), 28 PB04 (io), 29 PB03 (io), 30 PB02 (io), 31 PB01 (io), 32 PB00 (io), 33 VREFN (power), 34 AIN3 (in), 35 AIN2 (in), 36 AIN1 (in), 37 AIN0 (in), 38 VREFP (power), 39 PA00 (io), 40 PA01 (io), 41 PA02 (io), 42 PA03 (io), 43 PA04 (io), 44 PA05 (io), 45 PA06 (io), 46 PA07 (io), 47 PA08 (io), 48 PA09 (io), 49 PA10 (io), 50 IOVDD (power), 51 DECOUPLE (io), 52 VREGSW (power), 53 VREGVDD (power), 54 VREGVSS (power), 55 DVDD (power), 56 AVDD (power), 57 IOVDD (power), 58 PD10 (io), 59 PD09 (io), 60 PD08 (io), 61 PD07 (io), 62 PD06 (io), 63 PD05 (io), 64 PD04 (io), 65 PD03 (io), 66 PD02 (io), 67 PD01 (io), 68 PD00 (io), 69 VSS (power)

## EFR32MG26B520F32
designator U?
No Description Available; RefDes: RefDes; Type: Type
footprint QFN_48_SIL
pins: 1 PC00 (io), 2 PC01 (io), 3 PC02 (io), 4 PC03 (io), 5 PC04 (io), 6 PC05 (io), 7 PC06 (io), 8 PC07 (io), 9 PC08 (io), 10 PC09 (io), 11 HFXTAL_I (in), 12 HFXTAL_O (out), 13 RESETN (io), 14 RFVDD (power), 15 RFVSS (power), 16 RF2G4_IO (io), 17 PAVDD (power), 18 PB03 (power), 19 PB02 (io), 20 PB01 (io), 21 PB00 (io), 22 VREFN (io), 23 AIN3 (power), 24 AIN2 (in), 25 AIN1 (in), 26 AIN0 (in), 27 VREFP (in), 28 PA00 (io), 29 PA01 (io), 30 PA02 (io), 31 PA03 (io), 32 PA04 (io), 33 PA05 (io), 34 PA06 (io), 35 PA07 (io), 36 DECOUPLE, 37 VREGSW (power), 38 VREGVDD (power), 39 VREGVSS (power), 40 DVDD (power), 41 AVDD (power), 42 IOVDD (power), 43 PD05 (io), 44 PD04 (io), 45 PD03 (io), 46 PD02 (io), 47 PD01 (io), 48 PD00 (io), 49 VSS (power)

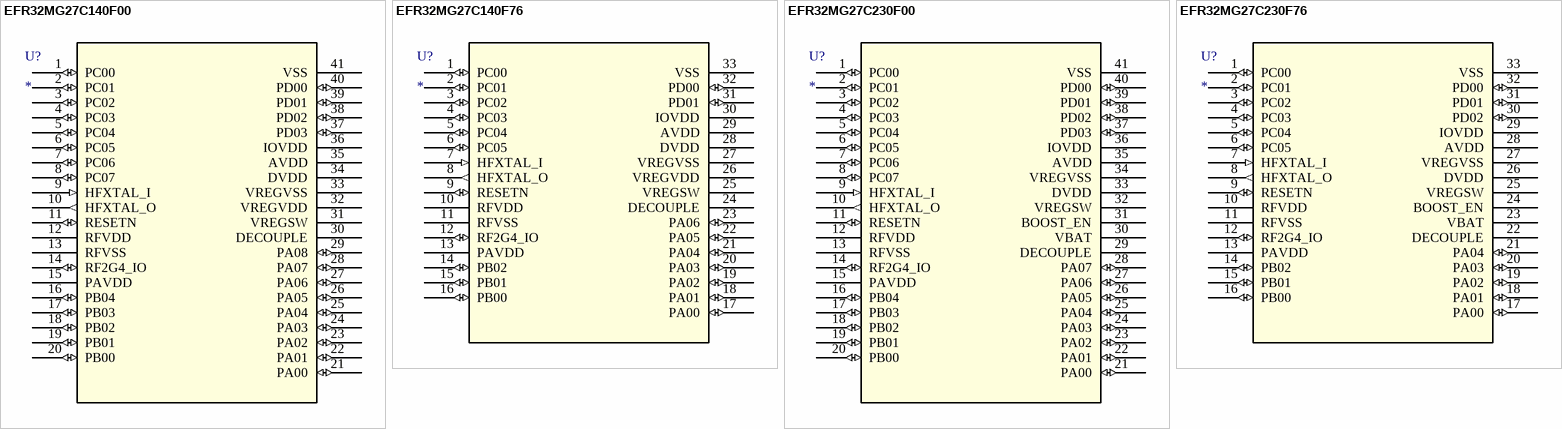
[diagram p11: symbols EFR32MG27C140F00 to EFR32MG27C230F76]

## EFR32MG27C140F00
designator U?
No Description Available; RefDes: RefDes; Type: Type
footprint QFN_40_SIL
pins: 1 PC00 (io), 2 PC01 (io), 3 PC02 (io), 4 PC03 (io), 5 PC04 (io), 6 PC05 (io), 7 PC06 (io), 8 PC07 (io), 9 HFXTAL_I (in), 10 HFXTAL_O (out), 11 RESETN (io), 12 RFVDD (power), 13 RFVSS (power), 14 RF2G4_IO (io), 15 PAVDD (power), 16 PB04 (io), 17 PB03 (io), 18 PB02 (io), 19 PB01 (io), 20 PB00 (io), 21 PA00 (io), 22 PA01 (io), 23 PA02 (io), 24 PA03 (io), 25 PA04 (io), 26 PA05 (io), 27 PA06 (io), 28 PA07 (io), 29 PA08 (io), 30 DECOUPLE, 31 VREGSW (power), 32 VREGVDD (power), 33 VREGVSS (power), 34 DVDD (power), 35 AVDD (power), 36 IOVDD (power), 37 PD03 (io), 38 PD02 (io), 39 PD01 (io), 40 PD00 (io), 41 VSS (power)

## EFR32MG27C140F76
designator U?
No Description Available; RefDes: RefDes; Type: Type
footprint QFN_32_SIL
pins: 1 PC00 (io), 2 PC01 (io), 3 PC02 (io), 4 PC03 (io), 5 PC04 (io), 6 PC05 (io), 7 HFXTAL_I (in), 8 HFXTAL_O (out), 9 RESETN (io), 10 RFVDD (power), 11 RFVSS (power), 12 RF2G4_IO (io), 13 PAVDD (power), 14 PB02 (io), 15 PB01 (io), 16 PB00 (io), 17 PA00 (io), 18 PA01 (io), 19 PA02 (io), 20 PA03 (io), 21 PA04 (io), 22 PA05 (io), 23 PA06 (io), 24 DECOUPLE, 25 VREGSW (power), 26 VREGVDD (power), 27 VREGVSS (power), 28 DVDD (power), 29 AVDD (power), 30 IOVDD (power), 31 PD01 (io), 32 PD00 (io), 33 VSS (power)

## EFR32MG27C230F00
designator U?
No Description Available; RefDes: RefDes; Type: Type
footprint QFN_40_SIL
pins: 1 PC00 (io), 2 PC01 (io), 3 PC02 (io), 4 PC03 (io), 5 PC04 (io), 6 PC05 (io), 7 PC06 (io), 8 PC07 (io), 9 HFXTAL_I (in), 10 HFXTAL_O (out), 11 RESETN (io), 12 RFVDD (power), 13 RFVSS (power), 14 RF2G4_IO (io), 15 PAVDD (power), 16 PB04 (io), 17 PB03 (io), 18 PB02 (io), 19 PB01 (io), 20 PB00 (io), 21 PA00 (io), 22 PA01 (io), 23 PA02 (io), 24 PA03 (io), 25 PA04 (io), 26 PA05 (io), 27 PA06 (io), 28 PA07 (io), 29 DECOUPLE, 30 VBAT (power), 31 BOOST_EN, 32 VREGSW (power), 33 DVDD (power), 34 VREGVSS (power), 35 AVDD (power), 36 IOVDD (power), 37 PD03 (io), 38 PD02 (io), 39 PD01 (io), 40 PD00 (io), 41 VSS (power)

## EFR32MG27C230F76
designator U?
No Description Available; RefDes: RefDes; Type: Type
footprint QFN_32_SIL
pins: 1 PC00 (io), 2 PC01 (io), 3 PC02 (io), 4 PC03 (io), 5 PC04 (io), 6 PC05 (io), 7 HFXTAL_I (in), 8 HFXTAL_O (out), 9 RESETN (io), 10 RFVDD (power), 11 RFVSS (power), 12 RF2G4_IO (io), 13 PAVDD (power), 14 PB02 (io), 15 PB01 (io), 16 PB00 (io), 17 PA00 (io), 18 PA01 (io), 19 PA02 (io), 20 PA03 (io), 21 PA04 (io), 22 DECOUPLE, 23 VBAT (power), 24 BOOST_EN, 25 VREGSW (power), 26 DVDD (power), 27 VREGVSS (power), 28 AVDD (power), 29 IOVDD (power), 30 PD02 (io), 31 PD01 (io), 32 PD00 (io), 33 VSS (power)